# Altium footprint library 拨码开关.PcbLib: 39 footprints (part 2 of 3)
Each footprint in its own frame and in the unit in brackets; x right, y up, seen from the top. Pads: shape width x height; smd on the part's side, far side on the other; paste and mask are expansions set on the pad; w line width, h text height; cw(c..) or ccw(c..) is an arc to the next point about the centre after c.
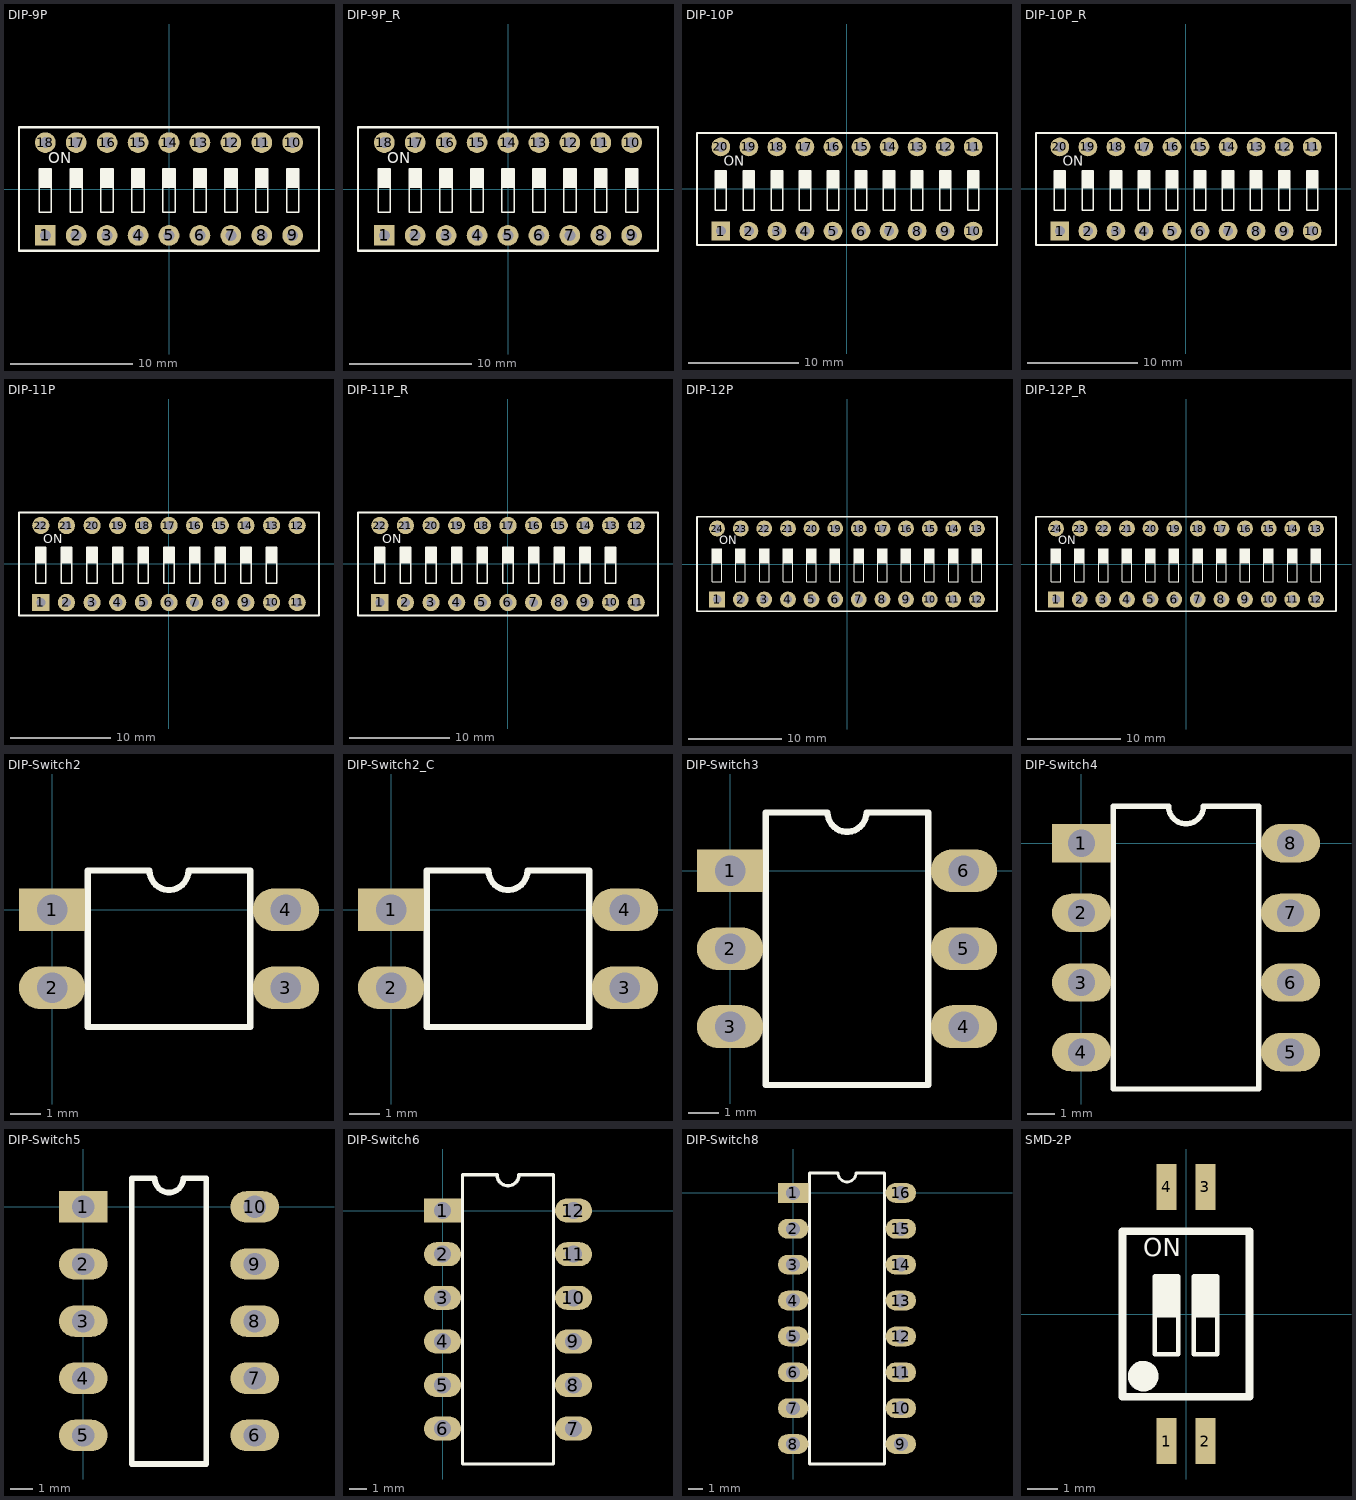
[diagram p1: the footprints below, top view; thin cyan lines are the x and y axes]

## DIP-9P [mm] "21.4*9.9*7mm"
pads (18):
  rect 1.7x1.7 hole 0.9: 1(-10.16,-3.81)
  round 1.7 hole 0.9: 2(-7.62,-3.81) 3(-5.08,-3.81) 4(-2.54,-3.81) 5(0,-3.81) 6(2.54,-3.81) 7(5.08,-3.81) 8(7.62,-3.81) 9(10.16,-3.81) 10(10.16,3.81) 11(7.62,3.81) 12(5.08,3.81) 13(2.54,3.81) 14(0,3.81) 15(-2.54,3.81) 16(-5.08,3.81) 17(-7.62,3.81) 18(-10.16,3.81)
Top Overlay:
  rectangle: 9.652,0.127 10.668,1.651
  rectangle: 4.572,0.127 5.588,1.651
  rectangle: -10.668,0.127 -9.652,1.651
  rectangle: -8.128,0.127 -7.112,1.651
  rectangle: -5.588,0.127 -4.572,1.651
  rectangle: -3.048,0.127 -2.032,1.651
  rectangle: -0.508,0.127 0.508,1.651
  rectangle: 2.032,0.127 3.048,1.651
  rectangle: 7.112,0.127 8.128,1.651
  lines w0.127: -10.668,0.127 -9.652,0.127 ; -8.128,0.127 -7.112,0.127 ; -5.588,0.127 -4.572,0.127 ; -3.048,0.127 -2.032,0.127 ; -0.508,0.127 0.508,0.127 ; 2.032,0.127 3.048,0.127 ; 4.572,0.127 5.588,0.127 ; 7.112,0.127 8.128,0.127 ; 9.652,0.127 10.668,0.127 ; -10.668,-1.905 -10.668,1.651 -9.652,1.651 -9.652,-1.905 -10.668,-1.905 ; -8.128,-1.905 -8.128,1.651 -7.112,1.651 -7.112,-1.905 -8.128,-1.905 ; -5.588,-1.905 -5.588,1.651 -4.572,1.651 -4.572,-1.905 -5.588,-1.905 ; -3.048,-1.905 -3.048,1.651 -2.032,1.651 -2.032,-1.905 -3.048,-1.905 ; -0.508,-1.905 -0.508,1.651 0.508,1.651 0.508,-1.905 -0.508,-1.905 ; 2.032,-1.905 2.032,1.651 3.048,1.651 3.048,-1.905 2.032,-1.905 ; 4.572,-1.905 5.588,-1.905 5.588,1.651 4.572,1.651 4.572,-1.905 ; 7.112,-1.905 7.112,1.651 8.128,1.651 8.128,-1.905 7.112,-1.905 ; 9.652,-1.905 10.668,-1.905 10.668,1.651 9.652,1.651 9.652,-1.905
  lines w0.2: -12.319,-5.08 -12.319,5.08 12.319,5.08 12.319,-5.08 -12.319,-5.08
  text "ON" at -9.906,1.778 h1.52
3D body "DIP-9P.STEP": height 6.65, standoff -3.15, extent -12.192,-4.95 12.228,4.95

## DIP-9P_R [mm] "21.4*9.9*7mm"
pads (18):
  rect 1.7x1.7 hole 0.9: 1(-10.16,-3.81)
  round 1.7 hole 0.9: 2(-7.62,-3.81) 3(-5.08,-3.81) 4(-2.54,-3.81) 5(0,-3.81) 6(2.54,-3.81) 7(5.08,-3.81) 8(7.62,-3.81) 9(10.16,-3.81) 10(10.16,3.81) 11(7.62,3.81) 12(5.08,3.81) 13(2.54,3.81) 14(0,3.81) 15(-2.54,3.81) 16(-5.08,3.81) 17(-7.62,3.81) 18(-10.16,3.81)
Top Overlay:
  rectangle: 9.652,0.127 10.668,1.651
  rectangle: 4.572,0.127 5.588,1.651
  rectangle: -10.668,0.127 -9.652,1.651
  rectangle: -8.128,0.127 -7.112,1.651
  rectangle: -5.588,0.127 -4.572,1.651
  rectangle: -3.048,0.127 -2.032,1.651
  rectangle: -0.508,0.127 0.508,1.651
  rectangle: 2.032,0.127 3.048,1.651
  rectangle: 7.112,0.127 8.128,1.651
  lines w0.127: -10.668,0.127 -9.652,0.127 ; -8.128,0.127 -7.112,0.127 ; -5.588,0.127 -4.572,0.127 ; -3.048,0.127 -2.032,0.127 ; -0.508,0.127 0.508,0.127 ; 2.032,0.127 3.048,0.127 ; 4.572,0.127 5.588,0.127 ; 7.112,0.127 8.128,0.127 ; 9.652,0.127 10.668,0.127 ; -10.668,-1.905 -10.668,1.651 -9.652,1.651 -9.652,-1.905 -10.668,-1.905 ; -8.128,-1.905 -8.128,1.651 -7.112,1.651 -7.112,-1.905 -8.128,-1.905 ; -5.588,-1.905 -5.588,1.651 -4.572,1.651 -4.572,-1.905 -5.588,-1.905 ; -3.048,-1.905 -3.048,1.651 -2.032,1.651 -2.032,-1.905 -3.048,-1.905 ; -0.508,-1.905 -0.508,1.651 0.508,1.651 0.508,-1.905 -0.508,-1.905 ; 2.032,-1.905 2.032,1.651 3.048,1.651 3.048,-1.905 2.032,-1.905 ; 4.572,-1.905 5.588,-1.905 5.588,1.651 4.572,1.651 4.572,-1.905 ; 7.112,-1.905 7.112,1.651 8.128,1.651 8.128,-1.905 7.112,-1.905 ; 9.652,-1.905 10.668,-1.905 10.668,1.651 9.652,1.651 9.652,-1.905
  lines w0.2: -12.319,-5.08 -12.319,5.08 12.319,5.08 12.319,-5.08 -12.319,-5.08
  text "ON" at -9.906,1.778 h1.52
3D body "DIP-9P_R.STEP": height 6.65, standoff -3.15, extent -12.192,-4.947 12.228,4.953

## DIP-10P [mm] "27*9.9*7mm"
pads (20):
  rect 1.7x1.7 hole 0.9: 1(-11.43,-3.81)
  round 1.7 hole 0.9: 2(-8.89,-3.81) 3(-6.35,-3.81) 4(-3.81,-3.81) 5(-1.27,-3.81) 6(1.27,-3.81) 7(3.81,-3.81) 8(6.35,-3.81) 9(8.89,-3.81) 10(11.43,-3.81) 11(11.43,3.81) 12(8.89,3.81) 13(6.35,3.81) 14(3.81,3.81) 15(1.27,3.81) 16(-1.27,3.81) 17(-3.81,3.81) 18(-6.35,3.81) 19(-8.89,3.81) 20(-11.43,3.81)
Top Overlay:
  rectangle: 5.842,0.127 6.858,1.651
  rectangle: 0.762,0.127 1.778,1.651
  rectangle: -1.778,0.127 -0.762,1.651
  rectangle: -4.318,0.127 -3.302,1.651
  rectangle: -6.858,0.127 -5.842,1.651
  rectangle: -9.398,0.127 -8.382,1.651
  rectangle: -11.938,0.127 -10.922,1.651
  rectangle: 3.302,0.127 4.318,1.651
  rectangle: 8.382,0.127 9.398,1.651
  rectangle: 10.922,0.127 11.938,1.651
  lines w0.127: -11.938,0.127 -10.922,0.127 ; -9.398,0.127 -8.382,0.127 ; -6.858,0.127 -5.842,0.127 ; -4.318,0.127 -3.302,0.127 ; -1.778,0.127 -0.762,0.127 ; 0.762,0.127 1.778,0.127 ; 3.302,0.127 4.318,0.127 ; 5.842,0.127 6.858,0.127 ; 8.382,0.127 9.398,0.127 ; 10.922,0.127 11.938,0.127 ; -11.938,-1.905 -10.922,-1.905 -10.922,1.651 -11.938,1.651 -11.938,-1.905 ; -9.398,-1.905 -8.382,-1.905 -8.382,1.651 -9.398,1.651 -9.398,-1.905 ; -6.858,-1.905 -5.842,-1.905 -5.842,1.651 -6.858,1.651 -6.858,-1.905 ; -4.318,-1.905 -3.302,-1.905 -3.302,1.651 -4.318,1.651 -4.318,-1.905 ; -1.778,-1.905 -0.762,-1.905 -0.762,1.651 -1.778,1.651 -1.778,-1.905 ; 0.762,-1.905 1.778,-1.905 1.778,1.651 0.762,1.651 0.762,-1.905 ; 3.302,-1.905 3.302,1.651 4.318,1.651 4.318,-1.905 3.302,-1.905 ; 5.842,-1.905 6.858,-1.905 6.858,1.651 5.842,1.651 5.842,-1.905 ; 8.382,-1.905 8.382,1.651 9.398,1.651 9.398,-1.905 8.382,-1.905 ; 10.922,-1.905 11.938,-1.905 11.938,1.651 10.922,1.651 10.922,-1.905
  lines w0.2: -13.589,-5.08 13.589,-5.08 13.589,5.08 -13.589,5.08 -13.589,-5.08
  text "ON" at -11.176,1.778 h1.52
3D body "DIP-10P.STEP": height 6.65, standoff -3.15, extent -13.462,-4.947 13.498,4.953

## DIP-10P_R [mm] "27*9.9*7mm"
pads (20):
  rect 1.7x1.7 hole 0.9: 1(-11.43,-3.81)
  round 1.7 hole 0.9: 2(-8.89,-3.81) 3(-6.35,-3.81) 4(-3.81,-3.81) 5(-1.27,-3.81) 6(1.27,-3.81) 7(3.81,-3.81) 8(6.35,-3.81) 9(8.89,-3.81) 10(11.43,-3.81) 11(11.43,3.81) 12(8.89,3.81) 13(6.35,3.81) 14(3.81,3.81) 15(1.27,3.81) 16(-1.27,3.81) 17(-3.81,3.81) 18(-6.35,3.81) 19(-8.89,3.81) 20(-11.43,3.81)
Top Overlay:
  rectangle: 10.922,0.127 11.938,1.651
  rectangle: 8.382,0.127 9.398,1.651
  rectangle: 3.302,0.127 4.318,1.651
  rectangle: -11.938,0.127 -10.922,1.651
  rectangle: -9.398,0.127 -8.382,1.651
  rectangle: -6.858,0.127 -5.842,1.651
  rectangle: -4.318,0.127 -3.302,1.651
  rectangle: -1.778,0.127 -0.762,1.651
  rectangle: 0.762,0.127 1.778,1.651
  rectangle: 5.842,0.127 6.858,1.651
  lines w0.127: -11.938,0.127 -10.922,0.127 ; -9.398,0.127 -8.382,0.127 ; -6.858,0.127 -5.842,0.127 ; -4.318,0.127 -3.302,0.127 ; -1.778,0.127 -0.762,0.127 ; 0.762,0.127 1.778,0.127 ; 3.302,0.127 4.318,0.127 ; 5.842,0.127 6.858,0.127 ; 8.382,0.127 9.398,0.127 ; 10.922,0.127 11.938,0.127 ; -11.938,-1.905 -11.938,1.651 -10.922,1.651 -10.922,-1.905 -11.938,-1.905 ; -9.398,-1.905 -9.398,1.651 -8.382,1.651 -8.382,-1.905 -9.398,-1.905 ; -6.858,-1.905 -6.858,1.651 -5.842,1.651 -5.842,-1.905 -6.858,-1.905 ; -4.318,-1.905 -4.318,1.651 -3.302,1.651 -3.302,-1.905 -4.318,-1.905 ; -1.778,-1.905 -1.778,1.651 -0.762,1.651 -0.762,-1.905 -1.778,-1.905 ; 0.762,-1.905 0.762,1.651 1.778,1.651 1.778,-1.905 0.762,-1.905 ; 3.302,-1.905 4.318,-1.905 4.318,1.651 3.302,1.651 3.302,-1.905 ; 5.842,-1.905 5.842,1.651 6.858,1.651 6.858,-1.905 5.842,-1.905 ; 8.382,-1.905 9.398,-1.905 9.398,1.651 8.382,1.651 8.382,-1.905 ; 10.922,-1.905 10.922,1.651 11.938,1.651 11.938,-1.905 10.922,-1.905
  lines w0.2: -13.589,-5.08 -13.589,5.08 13.589,5.08 13.589,-5.08 -13.589,-5.08
  text "ON" at -11.176,1.778 h1.52
3D body "DIP-10P_R.STEP": height 6.65, standoff -3.15, extent -13.462,-4.953 13.498,4.947

## DIP-11P [mm] "29.5*9.9*7mm"
pads (22):
  rect 1.7x1.7 hole 0.9: 1(-12.7,-3.81)
  round 1.7 hole 0.9: 2(-10.16,-3.81) 3(-7.62,-3.81) 4(-5.08,-3.81) 5(-2.54,-3.81) 6(0,-3.81) 7(2.54,-3.81) 8(5.08,-3.81) 9(7.62,-3.81) 10(10.16,-3.81) 11(12.7,-3.81) 12(12.7,3.81) 13(10.16,3.81) 14(7.62,3.81) 15(5.08,3.81) 16(2.54,3.81) 17(0,3.81) 18(-2.54,3.81) 19(-5.08,3.81) 20(-7.62,3.81) 21(-10.16,3.81) 22(-12.7,3.81)
Top Overlay:
  rectangle: 9.652,0.127 10.668,1.651
  rectangle: 7.112,0.127 8.128,1.651
  rectangle: 2.032,0.127 3.048,1.651
  rectangle: -13.208,0.127 -12.192,1.651
  rectangle: -10.668,0.127 -9.652,1.651
  rectangle: -8.128,0.127 -7.112,1.651
  rectangle: -5.588,0.127 -4.572,1.651
  rectangle: -3.048,0.127 -2.032,1.651
  rectangle: -0.508,0.127 0.508,1.651
  rectangle: 4.572,0.127 5.588,1.651
  lines w0.127: -13.208,0.127 -12.192,0.127 ; -10.668,0.127 -9.652,0.127 ; -8.128,0.127 -7.112,0.127 ; -5.588,0.127 -4.572,0.127 ; -3.048,0.127 -2.032,0.127 ; -0.508,0.127 0.508,0.127 ; 2.032,0.127 3.048,0.127 ; 4.572,0.127 5.588,0.127 ; 7.112,0.127 8.128,0.127 ; 9.652,0.127 10.668,0.127 ; -13.208,-1.905 -13.208,1.651 -12.192,1.651 -12.192,-1.905 -13.208,-1.905 ; -10.668,-1.905 -10.668,1.651 -9.652,1.651 -9.652,-1.905 -10.668,-1.905 ; -8.128,-1.905 -8.128,1.651 -7.112,1.651 -7.112,-1.905 -8.128,-1.905 ; -5.588,-1.905 -5.588,1.651 -4.572,1.651 -4.572,-1.905 -5.588,-1.905 ; -3.048,-1.905 -3.048,1.651 -2.032,1.651 -2.032,-1.905 -3.048,-1.905 ; -0.508,-1.905 -0.508,1.651 0.508,1.651 0.508,-1.905 -0.508,-1.905 ; 2.032,-1.905 3.048,-1.905 3.048,1.651 2.032,1.651 2.032,-1.905 ; 4.572,-1.905 4.572,1.651 5.588,1.651 5.588,-1.905 4.572,-1.905 ; 7.112,-1.905 8.128,-1.905 8.128,1.651 7.112,1.651 7.112,-1.905 ; 9.652,-1.905 9.652,1.651 10.668,1.651 10.668,-1.905 9.652,-1.905
  lines w0.2: -14.859,-5.08 -14.859,5.08 14.859,5.08 14.859,-5.08 -14.859,-5.08
  text "ON" at -12.446,1.778 h1.52
3D body "DIP-11P.STEP": height 6.65, standoff -3.15, extent -14.732,-4.95 14.768,4.95

## DIP-11P_R [mm] "29.5*9.9*7mm"
pads (22):
  rect 1.7x1.7 hole 0.9: 1(-12.7,-3.81)
  round 1.7 hole 0.9: 2(-10.16,-3.81) 3(-7.62,-3.81) 4(-5.08,-3.81) 5(-2.54,-3.81) 6(0,-3.81) 7(2.54,-3.81) 8(5.08,-3.81) 9(7.62,-3.81) 10(10.16,-3.81) 11(12.7,-3.81) 12(12.7,3.81) 13(10.16,3.81) 14(7.62,3.81) 15(5.08,3.81) 16(2.54,3.81) 17(0,3.81) 18(-2.54,3.81) 19(-5.08,3.81) 20(-7.62,3.81) 21(-10.16,3.81) 22(-12.7,3.81)
Top Overlay:
  rectangle: 4.572,0.127 5.588,1.651
  rectangle: -0.508,0.127 0.508,1.651
  rectangle: -3.048,0.127 -2.032,1.651
  rectangle: -5.588,0.127 -4.572,1.651
  rectangle: -8.128,0.127 -7.112,1.651
  rectangle: -10.668,0.127 -9.652,1.651
  rectangle: -13.208,0.127 -12.192,1.651
  rectangle: 2.032,0.127 3.048,1.651
  rectangle: 7.112,0.127 8.128,1.651
  rectangle: 9.652,0.127 10.668,1.651
  lines w0.127: -13.208,0.127 -12.192,0.127 ; -10.668,0.127 -9.652,0.127 ; -8.128,0.127 -7.112,0.127 ; -5.588,0.127 -4.572,0.127 ; -3.048,0.127 -2.032,0.127 ; -0.508,0.127 0.508,0.127 ; 2.032,0.127 3.048,0.127 ; 4.572,0.127 5.588,0.127 ; 7.112,0.127 8.128,0.127 ; 9.652,0.127 10.668,0.127 ; -13.208,-1.905 -12.192,-1.905 -12.192,1.651 -13.208,1.651 -13.208,-1.905 ; -10.668,-1.905 -9.652,-1.905 -9.652,1.651 -10.668,1.651 -10.668,-1.905 ; -8.128,-1.905 -7.112,-1.905 -7.112,1.651 -8.128,1.651 -8.128,-1.905 ; -5.588,-1.905 -4.572,-1.905 -4.572,1.651 -5.588,1.651 -5.588,-1.905 ; -3.048,-1.905 -2.032,-1.905 -2.032,1.651 -3.048,1.651 -3.048,-1.905 ; -0.508,-1.905 0.508,-1.905 0.508,1.651 -0.508,1.651 -0.508,-1.905 ; 2.032,-1.905 2.032,1.651 3.048,1.651 3.048,-1.905 2.032,-1.905 ; 4.572,-1.905 5.588,-1.905 5.588,1.651 4.572,1.651 4.572,-1.905 ; 7.112,-1.905 7.112,1.651 8.128,1.651 8.128,-1.905 7.112,-1.905 ; 9.652,-1.905 10.668,-1.905 10.668,1.651 9.652,1.651 9.652,-1.905
  lines w0.2: -14.859,-5.08 14.859,-5.08 14.859,5.08 -14.859,5.08 -14.859,-5.08
  text "ON" at -12.446,1.778 h1.52
3D body "DIP-11P_R.STEP": height 6.65, standoff -3.15, extent -14.732,-4.95 14.768,4.95

## DIP-12P [mm] "32.1*9.9*7mm"
pads (24):
  rect 1.7x1.7 hole 0.9: 1(-13.97,-3.81)
  round 1.7 hole 0.9: 2(-11.43,-3.81) 3(-8.89,-3.81) 4(-6.35,-3.81) 5(-3.81,-3.81) 6(-1.27,-3.81) 7(1.27,-3.81) 8(3.81,-3.81) 9(6.35,-3.81) 10(8.89,-3.81) 11(11.43,-3.81) 12(13.97,-3.81) 13(13.97,3.81) 14(11.43,3.81) 15(8.89,3.81) 16(6.35,3.81) 17(3.81,3.81) 18(1.27,3.81) 19(-1.27,3.81) 20(-3.81,3.81) 21(-6.35,3.81) 22(-8.89,3.81) 23(-11.43,3.81) 24(-13.97,3.81)
Top Overlay:
  rectangle: 8.382,0.127 9.398,1.651
  rectangle: 5.842,0.127 6.858,1.651
  rectangle: 0.762,0.127 1.778,1.651
  rectangle: -14.478,0.127 -13.462,1.651
  rectangle: -11.938,0.127 -10.922,1.651
  rectangle: -9.398,0.127 -8.382,1.651
  rectangle: -6.858,0.127 -5.842,1.651
  rectangle: -4.318,0.127 -3.302,1.651
  rectangle: -1.778,0.127 -0.762,1.651
  rectangle: 3.302,0.127 4.318,1.651
  rectangle: 10.922,0.127 11.938,1.651
  rectangle: 13.462,0.127 14.478,1.651
  lines w0.127: -14.478,0.127 -13.462,0.127 ; -11.938,0.127 -10.922,0.127 ; -9.398,0.127 -8.382,0.127 ; -6.858,0.127 -5.842,0.127 ; -4.318,0.127 -3.302,0.127 ; -1.778,0.127 -0.762,0.127 ; 0.762,0.127 1.778,0.127 ; 3.302,0.127 4.318,0.127 ; 5.842,0.127 6.858,0.127 ; 8.382,0.127 9.398,0.127 ; 10.922,0.127 11.938,0.127 ; 13.462,0.127 14.478,0.127 ; -14.478,-1.905 -14.478,1.651 -13.462,1.651 -13.462,-1.905 -14.478,-1.905 ; -11.938,-1.905 -11.938,1.651 -10.922,1.651 -10.922,-1.905 -11.938,-1.905 ; -9.398,-1.905 -9.398,1.651 -8.382,1.651 -8.382,-1.905 -9.398,-1.905 ; -6.858,-1.905 -6.858,1.651 -5.842,1.651 -5.842,-1.905 -6.858,-1.905 ; -4.318,-1.905 -4.318,1.651 -3.302,1.651 -3.302,-1.905 -4.318,-1.905 ; -1.778,-1.905 -1.778,1.651 -0.762,1.651 -0.762,-1.905 -1.778,-1.905 ; 0.762,-1.905 1.778,-1.905 1.778,1.651 0.762,1.651 0.762,-1.905 ; 3.302,-1.905 3.302,1.651 4.318,1.651 4.318,-1.905 3.302,-1.905 ; 5.842,-1.905 6.858,-1.905 6.858,1.651 5.842,1.651 5.842,-1.905 ; 8.382,-1.905 8.382,1.651 9.398,1.651 9.398,-1.905 8.382,-1.905 ; 10.922,-1.905 10.922,1.651 11.938,1.651 11.938,-1.905 10.922,-1.905 ; 13.462,-1.905 14.478,-1.905 14.478,1.651 13.462,1.651 13.462,-1.905
  lines w0.2: -16.129,-5.08 -16.129,5.08 16.129,5.08 16.129,-5.08 -16.129,-5.08
  text "ON" at -13.716,1.778 h1.52
3D body "DIP-12P.STEP": height 6.65, standoff -3.15, extent -16.002,-4.953 16.038,4.947

## DIP-12P_R [mm] "32.1*9.9*7mm"
pads (24):
  rect 1.7x1.7 hole 0.9: 1(-13.97,-3.81)
  round 1.7 hole 0.9: 2(-11.43,-3.81) 3(-8.89,-3.81) 4(-6.35,-3.81) 5(-3.81,-3.81) 6(-1.27,-3.81) 7(1.27,-3.81) 8(3.81,-3.81) 9(6.35,-3.81) 10(8.89,-3.81) 11(11.43,-3.81) 12(13.97,-3.81) 13(13.97,3.81) 14(11.43,3.81) 15(8.89,3.81) 16(6.35,3.81) 17(3.81,3.81) 18(1.27,3.81) 19(-1.27,3.81) 20(-3.81,3.81) 21(-6.35,3.81) 22(-8.89,3.81) 23(-11.43,3.81) 24(-13.97,3.81)
Top Overlay:
  rectangle: 13.462,0.127 14.478,1.651
  rectangle: 10.922,0.127 11.938,1.651
  rectangle: 3.302,0.127 4.318,1.651
  rectangle: -1.778,0.127 -0.762,1.651
  rectangle: -4.318,0.127 -3.302,1.651
  rectangle: -6.858,0.127 -5.842,1.651
  rectangle: -9.398,0.127 -8.382,1.651
  rectangle: -11.938,0.127 -10.922,1.651
  rectangle: -14.478,0.127 -13.462,1.651
  rectangle: 0.762,0.127 1.778,1.651
  rectangle: 5.842,0.127 6.858,1.651
  rectangle: 8.382,0.127 9.398,1.651
  lines w0.127: -14.478,0.127 -13.462,0.127 ; -11.938,0.127 -10.922,0.127 ; -9.398,0.127 -8.382,0.127 ; -6.858,0.127 -5.842,0.127 ; -4.318,0.127 -3.302,0.127 ; -1.778,0.127 -0.762,0.127 ; 0.762,0.127 1.778,0.127 ; 3.302,0.127 4.318,0.127 ; 5.842,0.127 6.858,0.127 ; 8.382,0.127 9.398,0.127 ; 10.922,0.127 11.938,0.127 ; 13.462,0.127 14.478,0.127 ; -14.478,-1.905 -13.462,-1.905 -13.462,1.651 -14.478,1.651 -14.478,-1.905 ; -11.938,-1.905 -10.922,-1.905 -10.922,1.651 -11.938,1.651 -11.938,-1.905 ; -9.398,-1.905 -8.382,-1.905 -8.382,1.651 -9.398,1.651 -9.398,-1.905 ; -6.858,-1.905 -5.842,-1.905 -5.842,1.651 -6.858,1.651 -6.858,-1.905 ; -4.318,-1.905 -3.302,-1.905 -3.302,1.651 -4.318,1.651 -4.318,-1.905 ; -1.778,-1.905 -0.762,-1.905 -0.762,1.651 -1.778,1.651 -1.778,-1.905 ; 0.762,-1.905 0.762,1.651 1.778,1.651 1.778,-1.905 0.762,-1.905 ; 3.302,-1.905 4.318,-1.905 4.318,1.651 3.302,1.651 3.302,-1.905 ; 5.842,-1.905 5.842,1.651 6.858,1.651 6.858,-1.905 5.842,-1.905 ; 8.382,-1.905 9.398,-1.905 9.398,1.651 8.382,1.651 8.382,-1.905 ; 10.922,-1.905 11.938,-1.905 11.938,1.651 10.922,1.651 10.922,-1.905 ; 13.462,-1.905 13.462,1.651 14.478,1.651 14.478,-1.905 13.462,-1.905
  lines w0.2: -16.129,-5.08 16.129,-5.08 16.129,5.08 -16.129,5.08 -16.129,-5.08
  text "ON" at -13.716,1.778 h1.52
3D body "DIP-12P_R.STEP": height 6.65, standoff -3.15, extent -16.002,-4.953 16.038,4.947

## DIP-Switch2 [mil]
pads (4):
  rect 85x55 hole 39: 1(0,0)
  oval 85x55 hole 39: 2(0,-100) 3(300,-100) 4(300,0)
Top Overlay:
  lines w7.87: 45.67,-150.39 254.33,-150.39 254.33,50.39 175,50.39 cw(c150,50.39) 125,50.39 45.67,50.39 45.67,-150.39
3D body "19604.stp": height 204.33, standoff -150, extent -9.55,-188.76 313.56,90.77

## DIP-Switch2_C [mil]
pads (4):
  rect 85x55 hole 39: 1(0,0)
  oval 85x55 hole 39: 2(0,-100) 3(300,-100) 4(300,0)
Top Overlay:
  lines w7.87: 45.67,-150.39 254.33,-150.39 254.33,50.39 175,50.39 cw(c150,50.39) 125,50.39 45.67,50.39 45.67,-150.39
3D body "User Library-Switch-Piano-DIP-2.STEP": height 354.33, standoff -157.48, extent -43.43,-171.22 403.43,65

## DIP-Switch3 [mil]
pads (6):
  rect 85x55 hole 39 paste+0 mask+4: 1(0,0)
  oval 85x55 hole 39 paste+0 mask+4: 2(0,-100) 3(0,-200) 4(300,-200) 5(300,-100) 6(300,0)
Top Overlay:
  lines w7.87: 45.67,-275 254.33,-275 254.33,75 175,75 cw(c150,75) 125,75 45.67,75 45.67,-275
3D body "19755.stp": height 153.15, standoff -150, extent -54.57,-270.5 359,66.5

## DIP-Switch4 [mil]
pads (8):
  rect 85x55 hole 39: 1(0,0)
  oval 85x55 hole 39: 2(0,-100) 3(0,-200) 4(0,-300) 5(300,-300) 6(300,-200) 7(300,-100) 8(300,0)
Top Overlay:
  lines w7.87: 45.67,-352.76 254.33,-352.76 254.33,52.76 175,52.76 cw(c150,52.76) 125,52.76 45.67,52.76 45.67,-352.76
3D body "19606.stp": height 204.33, standoff -150, extent -10.56,-391.15 312.56,89.16

## DIP-Switch5 [mil]
pads (10):
  rect 85x55 hole 39: 1(0,0)
  oval 85x55 hole 39: 2(0,-100) 3(0,-200) 4(0,-300) 5(0,-400) 6(300,-400) 7(300,-300) 8(300,-200) 9(300,-100) 10(300,0)
Top Overlay:
  lines w10: 85,-450 215,-450 215,50 175,50 cw(c150,50) 125,50 85,50 85,-450
3D body "User Library-DIP-Switch05.STEP": height 275.59, standoff -145.67, extent -45.77,-468.69 344,70.69

## DIP-Switch6 [mil]
pads (12):
  rect 85x55 hole 39: 1(0,0)
  oval 85x55 hole 39: 2(0,-100) 3(0,-200) 4(0,-300) 5(0,-400) 6(0,-500) 7(300,-500) 8(300,-400) 9(300,-300) 10(300,-200) 11(300,-100) 12(300,0)
Top Overlay:
  lines w7.87: 45.67,-581.1 254.33,-581.1 254.33,81.89 175,81.89 cw(c150,81.89) 125,81.89 45.67,81.89 45.67,-581.1
3D body "19607.stp": height 164.96, standoff -150, extent -6.56,-592.1 316.56,89

## DIP-Switch8 [mil]
pads (16):
  rect 85x55 hole 39: 1(0,0)
  oval 85x55 hole 39: 2(0,-100) 3(0,-200) 4(0,-300) 5(0,-400) 6(0,-500) 7(0,-600) 8(0,-700) 9(300,-700) 10(300,-600) 11(300,-500) 12(300,-400) 13(300,-300) 14(300,-200) 15(300,-100) 16(300,0)
Top Overlay:
  lines w7.87: 45.67,-755.51 45.67,55.51 125,55.51 ccw(c150,55.51) 175,55.51 254.33,55.51 254.33,-755.51 45.67,-755.51
3D body "SWITCH DIP-8.STEP": height 252.59, standoff -168.67, extent -49.88,-770.37 339.88,69

## SMD-2P [mm] "长：4.14mm，宽：5.4mm，高：2.3mm"
pads (4):
  rect 0.65x1.5 smd: 1(-0.635,-4.15) 2(0.635,-4.15) 3(0.635,4.15) 4(-0.635,4.15)
Top Overlay:
  circle w0.5: c-1.397,-2.032 r0.25
  region: -0.254,1.225 -1.016,1.225 -1.016,-0.045 -0.254,-0.045
  region: 1.016,1.225 0.254,1.225 0.254,-0.045 1.016,-0.045
  lines w0.15: -1.016,-0.045 -0.254,-0.045 ; 0.254,-0.045 1.016,-0.045 ; -1.016,-1.315 -0.254,-1.315 -0.254,1.225 -1.016,1.225 -1.016,-1.315 ; 0.254,-1.315 1.016,-1.315 1.016,1.225 0.254,1.225 0.254,-1.315
  lines w0.254: -2.07,-2.7 -2.07,2.7 2.07,2.7 2.07,-2.7 -2.07,-2.7
  text "ON" at -1.397,1.696 h1
3D body "SMD-2P.STEP": height 2.35, standoff 0, extent -2.108,-4.477 2.032,4.223